# Altium integrated library SBR10A45SP5-13.IntLib: 1 symbol
Pins are listed as number, name and electrical type; pins without a type are passive.

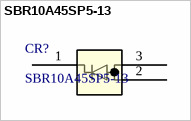
[diagram p0: symbol SBR10A45SP5-13]

## SBR10A45SP5-13
designator CR?
No Description Available; Manufacturer_Name: Diodes Inc; Copyright: Copyright (C) 2026 Ultra Librarian. All rights reserved.; Manufacturer_Part_Number: SBR10A45SP5-13; RefDes: RefDes; Type: Type
footprint POWERDI5_DIO
pins: 1 CATHODE, 2 ANODE, 3 ANODE